# Altium footprint library MicroProcessor$.PcbLib: 8 footprints (part 2 of 2)
Each footprint in its own frame and in the unit in brackets; x right, y up, seen from the top. Pads: shape width x height; smd on the part's side, far side on the other; paste and mask are expansions set on the pad; w line width, h text height; cw(c..) or ccw(c..) is an arc to the next point about the centre after c.
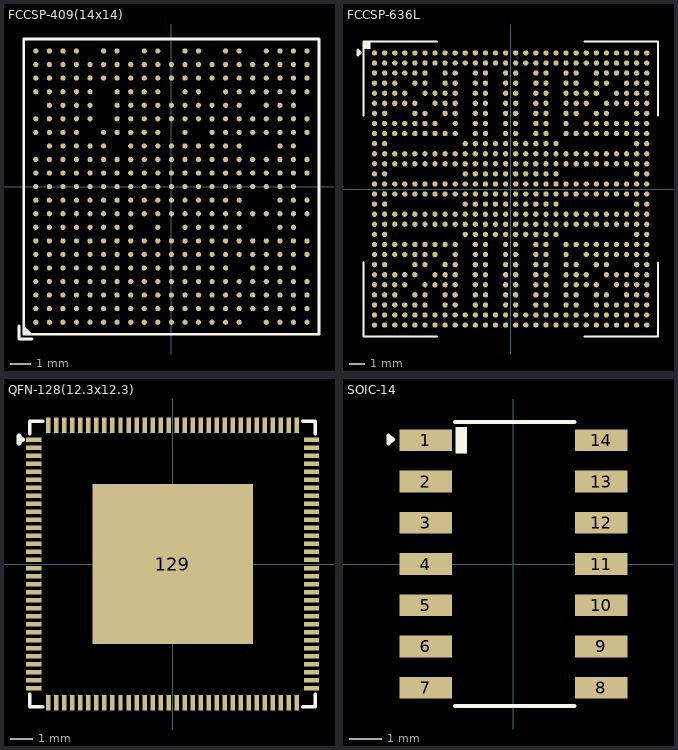
[diagram p1: the footprints below, top view; thin cyan lines are the x and y axes]

## FCCSP-409(14x14) [mm]
pads (409):
  round 0.248 smd paste-100 mask+0.051: A1(-6.5,-6.5) A2(-6.5,-5.85) A3(-6.5,-5.2) A4(-6.5,-4.55) A5(-6.5,-3.9) A6(-6.5,-3.25) A7(-6.5,-2.6) A8(-6.5,-1.95) A9(-6.5,-1.3) A10(-6.5,-0.65) A11(-6.5,0) A12(-6.5,0.65) A13(-6.5,1.3) A15(-6.5,2.6) A16(-6.5,3.25) A18(-6.5,4.55) A19(-6.5,5.2) A20(-6.5,5.85) A21(-6.5,6.5) AA1(6.5,-6.5) AA2(6.5,-5.85) AA3(6.5,-5.2) AA4(6.5,-4.55) AA6(6.5,-3.25) AA7(6.5,-2.6) AA9(6.5,-1.3) AA10(6.5,-0.65) AA12(6.5,0.65) AA13(6.5,1.3) AA15(6.5,2.6) AA16(6.5,3.25) AA18(6.5,4.55) AA19(6.5,5.2) AA20(6.5,5.85) AA21(6.5,6.5) B1(-5.85,-6.5) B2(-5.85,-5.85) B3(-5.85,-5.2) B4(-5.85,-4.55) B5(-5.85,-3.9) B6(-5.85,-3.25) B7(-5.85,-2.6) B8(-5.85,-1.95) B9(-5.85,-1.3) B10(-5.85,-0.65) B11(-5.85,0) B12(-5.85,0.65) B13(-5.85,1.3) B14(-5.85,1.95) B15(-5.85,2.6) B16(-5.85,3.25) B17(-5.85,3.9) B18(-5.85,4.55) B19(-5.85,5.2) B20(-5.85,5.85) B21(-5.85,6.5) C1(-5.2,-6.5) C2(-5.2,-5.85) C3(-5.2,-5.2) C4(-5.2,-4.55) C5(-5.2,-3.9) C6(-5.2,-3.25) C7(-5.2,-2.6) C8(-5.2,-1.95) C9(-5.2,-1.3) C10(-5.2,-0.65) C11(-5.2,0) C12(-5.2,0.65) C13(-5.2,1.3) C14(-5.2,1.95) C15(-5.2,2.6) C16(-5.2,3.25) C17(-5.2,3.9) C18(-5.2,4.55) C19(-5.2,5.2) C20(-5.2,5.85) C21(-5.2,6.5) D1(-4.55,-6.5) D2(-4.55,-5.85) D3(-4.55,-5.2) D4(-4.55,-4.55) D5(-4.55,-3.9) D6(-4.55,-3.25) D7(-4.55,-2.6) D8(-4.55,-1.95) D9(-4.55,-1.3) D10(-4.55,-0.65) D11(-4.55,0) D12(-4.55,0.65) D13(-4.55,1.3) D14(-4.55,1.95) D15(-4.55,2.6) D16(-4.55,3.25) D17(-4.55,3.9) D18(-4.55,4.55) D19(-4.55,5.2) D20(-4.55,5.85) D21(-4.55,6.5) E1(-3.9,-6.5) E2(-3.9,-5.85) E3(-3.9,-5.2) E4(-3.9,-4.55) E5(-3.9,-3.9) E6(-3.9,-3.25) E7(-3.9,-2.6) E8(-3.9,-1.95) E9(-3.9,-1.3) E10(-3.9,-0.65) E11(-3.9,0) E12(-3.9,0.65) E13(-3.9,1.3) E14(-3.9,1.95) E16(-3.9,3.25) E17(-3.9,3.9) E18(-3.9,4.55) E19(-3.9,5.2) E20(-3.9,5.85) F1(-3.25,-6.5) F2(-3.25,-5.85) F3(-3.25,-5.2) F4(-3.25,-4.55) F5(-3.25,-3.9) F6(-3.25,-3.25) F7(-3.25,-2.6) F8(-3.25,-1.95) F9(-3.25,-1.3) F10(-3.25,-0.65) F11(-3.25,0) F12(-3.25,0.65) F13(-3.25,1.3) F14(-3.25,1.95) F15(-3.25,2.6) F19(-3.25,5.2) F20(-3.25,5.85) F21(-3.25,6.5) G1(-2.6,-6.5) G2(-2.6,-5.85) G3(-2.6,-5.2) G4(-2.6,-4.55) G5(-2.6,-3.9) G6(-2.6,-3.25) G7(-2.6,-2.6) G8(-2.6,-1.95) G9(-2.6,-1.3) G10(-2.6,-0.65) G11(-2.6,0) G12(-2.6,0.65) G13(-2.6,1.3) G15(-2.6,2.6) G16(-2.6,3.25) G17(-2.6,3.9) G18(-2.6,4.55) G19(-2.6,5.2) G20(-2.6,5.85) G21(-2.6,6.5) H1(-1.95,-6.5) H2(-1.95,-5.85) H3(-1.95,-5.2) H4(-1.95,-4.55) H5(-1.95,-3.9) H6(-1.95,-3.25) H7(-1.95,-2.6) H8(-1.95,-1.95) H9(-1.95,-1.3) H10(-1.95,-0.65) H11(-1.95,0) H12(-1.95,0.65) H13(-1.95,1.3) H14(-1.95,1.95) H15(-1.95,2.6) H16(-1.95,3.25) H17(-1.95,3.9) H18(-1.95,4.55) H19(-1.95,5.2) H20(-1.95,5.85) J1(-1.3,-6.5) J2(-1.3,-5.85) J3(-1.3,-5.2) J4(-1.3,-4.55) J5(-1.3,-3.9) J6(-1.3,-3.25) J7(-1.3,-2.6) J9(-1.3,-1.3) J10(-1.3,-0.65) J11(-1.3,0) J12(-1.3,0.65) J13(-1.3,1.3) J14(-1.3,1.95) J15(-1.3,2.6) J16(-1.3,3.25) J17(-1.3,3.9) J18(-1.3,4.55) J19(-1.3,5.2) J20(-1.3,5.85) J21(-1.3,6.5) K1(-0.65,-6.5) K2(-0.65,-5.85) K3(-0.65,-5.2) K4(-0.65,-4.55) K5(-0.65,-3.9) K6(-0.65,-3.25) K7(-0.65,-2.6) K8(-0.65,-1.95) K9(-0.65,-1.3) K10(-0.65,-0.65) K11(-0.65,0) K12(-0.65,0.65) K13(-0.65,1.3) K14(-0.65,1.95) K15(-0.65,2.6) K16(-0.65,3.25) K17(-0.65,3.9) K18(-0.65,4.55) K19(-0.65,5.2) K20(-0.65,5.85) K21(-0.65,6.5) L1(0,-6.5) L2(0,-5.85) L3(0,-5.2) L4(0,-4.55) L5(0,-3.9) L6(0,-3.25) L7(0,-2.6) L9(0,-1.3) L10(0,-0.65) L11(0,0) L12(0,0.65) L13(0,1.3) L14(0,1.95) L16(0,3.25) L17(0,3.9) L19(0,5.2) L20(0,5.85) M1(0.65,-6.5) M2(0.65,-5.85) M3(0.65,-5.2) M4(0.65,-4.55) M5(0.65,-3.9) M6(0.65,-3.25) M7(0.65,-2.6) M8(0.65,-1.95) M9(0.65,-1.3) M10(0.65,-0.65) M11(0.65,0) M12(0.65,0.65) M13(0.65,1.3) M14(0.65,1.95) M15(0.65,2.6) M16(0.65,3.25) M17(0.65,3.9) M18(0.65,4.55) M19(0.65,5.2) M20(0.65,5.85) M21(0.65,6.5) N1(1.3,-6.5) N2(1.3,-5.85) N3(1.3,-5.2) N4(1.3,-4.55) N5(1.3,-3.9) N6(1.3,-3.25) N7(1.3,-2.6) N8(1.3,-1.95) N9(1.3,-1.3) N10(1.3,-0.65) N11(1.3,0) N12(1.3,0.65) N13(1.3,1.3) N14(1.3,1.95) N16(1.3,3.25) N17(1.3,3.9) N18(1.3,4.55) N19(1.3,5.2) N20(1.3,5.85) N21(1.3,6.5) P1(1.95,-6.5) P2(1.95,-5.85) P3(1.95,-5.2) P4(1.95,-4.55) P5(1.95,-3.9) P6(1.95,-3.25) P7(1.95,-2.6) P8(1.95,-1.95) P9(1.95,-1.3) P10(1.95,-0.65) P11(1.95,0) P12(1.95,0.65) P13(1.95,1.3) P14(1.95,1.95) P15(1.95,2.6) P16(1.95,3.25) P17(1.95,3.9) P19(1.95,5.2) P20(1.95,5.85) R1(2.6,-6.5) R2(2.6,-5.85) R3(2.6,-5.2) R4(2.6,-4.55) R5(2.6,-3.9) R6(2.6,-3.25) R7(2.6,-2.6) R8(2.6,-1.95) R9(2.6,-1.3) R10(2.6,-0.65) R11(2.6,0) R12(2.6,0.65) R13(2.6,1.3) R14(2.6,1.95) R15(2.6,2.6) R16(2.6,3.25) R17(2.6,3.9) R18(2.6,4.55) R19(2.6,5.2) R20(2.6,5.85) R21(2.6,6.5) T1(3.25,-6.5) T2(3.25,-5.85) T3(3.25,-5.2) T4(3.25,-4.55) T6(3.25,-3.25) T7(3.25,-2.6) T8(3.25,-1.95) T9(3.25,-1.3) T10(3.25,-0.65) T11(3.25,0) T12(3.25,0.65) T13(3.25,1.3) T14(3.25,1.95) T15(3.25,2.6) T16(3.25,3.25) T17(3.25,3.9) T18(3.25,4.55) T19(3.25,5.2) T20(3.25,5.85) T21(3.25,6.5) U2(3.9,-5.85) U3(3.9,-5.2) U4(3.9,-4.55) U5(3.9,-3.9) U6(3.9,-3.25) U7(3.9,-2.6) U9(3.9,-1.3) U11(3.9,0) U12(3.9,0.65) U13(3.9,1.3) U15(3.9,2.6) U16(3.9,3.25) U18(3.9,4.55) U19(3.9,5.2) U20(3.9,5.85) V1(4.55,-6.5) V2(4.55,-5.85) V3(4.55,-5.2) V4(4.55,-4.55) V5(4.55,-3.9) V6(4.55,-3.25) V7(4.55,-2.6) V9(4.55,-1.3) V11(4.55,0) V12(4.55,0.65) V13(4.55,1.3) V15(4.55,2.6) V16(4.55,3.25) V17(4.55,3.9) V18(4.55,4.55) V19(4.55,5.2) V20(4.55,5.85) V21(4.55,6.5) W1(5.2,-6.5) W2(5.2,-5.85) W3(5.2,-5.2) W4(5.2,-4.55) W5(5.2,-3.9) W6(5.2,-3.25) W7(5.2,-2.6) W8(5.2,-1.95) W9(5.2,-1.3) W10(5.2,-0.65) W11(5.2,0) W12(5.2,0.65) W13(5.2,1.3) W14(5.2,1.95) W15(5.2,2.6) W16(5.2,3.25) W17(5.2,3.9) W18(5.2,4.55) W19(5.2,5.2) W20(5.2,5.85) W21(5.2,6.5) Y1(5.85,-6.5) Y2(5.85,-5.85) Y3(5.85,-5.2) Y4(5.85,-4.55) Y5(5.85,-3.9) Y6(5.85,-3.25) Y7(5.85,-2.6) Y8(5.85,-1.95) Y9(5.85,-1.3) Y10(5.85,-0.65) Y11(5.85,0) Y12(5.85,0.65) Y13(5.85,1.3) Y14(5.85,1.95) Y15(5.85,2.6) Y16(5.85,3.25) Y17(5.85,3.9) Y18(5.85,4.55) Y19(5.85,5.2) Y20(5.85,5.85) Y21(5.85,6.5)
Top Overlay:
  region: -7.076,-7.076 -6.676,-7.076 -7.076,-6.676
  lines w0.127: -7.076,-7.076 7.076,-7.076 7.076,7.076 -7.076,7.076 -7.076,-7.076
  lines w0.152: -7.305,-6.676 -7.305,-7.305 -6.676,-7.305
Top Paste:
  drawing of 409 lines, arcs and shapes, not listed
3D body "3D_PCB1_2024-06-04.step": height 0.84, standoff 0, extent -7,-7 7,7

## FCCSP-636L [mm]
pads (636):
  round 0.34 smd: A1(-8.775,8.775) A2(-8.125,8.775) A3(-7.475,8.775) A4(-6.825,8.775) A5(-6.175,8.775) A6(-5.525,8.775) A7(-4.875,8.775) A8(-4.225,8.775) A9(-3.575,8.775) A10(-2.925,8.775) A11(-2.275,8.775) A12(-1.625,8.775) A13(-0.975,8.775) A14(-0.325,8.775) A15(0.325,8.775) A16(0.975,8.775) A17(1.625,8.775) A18(2.275,8.775) A19(2.925,8.775) A20(3.575,8.775) A21(4.225,8.775) A22(4.875,8.775) A23(5.525,8.775) A24(6.175,8.775) A25(6.825,8.775) A26(7.475,8.775) A27(8.125,8.775) A28(8.775,8.775) AA1(-8.775,-4.225) AA2(-8.125,-4.225) AA3(-7.475,-4.225) AA4(-6.825,-4.225) AA5(-6.175,-4.225) AA6(-5.525,-4.225) AA7(-4.875,-4.225) AA9(-3.575,-4.225) AA11(-2.275,-4.225) AA12(-1.625,-4.225) AA14(-0.325,-4.225) AA15(0.325,-4.225) AA17(1.625,-4.225) AA18(2.275,-4.225) AA20(3.575,-4.225) AA22(4.875,-4.225) AA23(5.525,-4.225) AA24(6.175,-4.225) AA25(6.825,-4.225) AA26(7.475,-4.225) AA27(8.125,-4.225) AA28(8.775,-4.225) AB1(-8.775,-4.875) AB2(-8.125,-4.875) AB5(-6.175,-4.875) AB6(-5.525,-4.875) AB8(-4.225,-4.875) AB9(-3.575,-4.875) AB11(-2.275,-4.875) AB12(-1.625,-4.875) AB14(-0.325,-4.875) AB15(0.325,-4.875) AB17(1.625,-4.875) AB18(2.275,-4.875) AB20(3.575,-4.875) AB21(4.225,-4.875) AB23(5.525,-4.875) AB24(6.175,-4.875) AB27(8.125,-4.875) AB28(8.775,-4.875) AC1(-8.775,-5.525) AC2(-8.125,-5.525) AC3(-7.475,-5.525) AC4(-6.825,-5.525) AC5(-6.175,-5.525) AC7(-4.875,-5.525) AC8(-4.225,-5.525) AC9(-3.575,-5.525) AC11(-2.275,-5.525) AC12(-1.625,-5.525) AC14(-0.325,-5.525) AC15(0.325,-5.525) AC17(1.625,-5.525) AC18(2.275,-5.525) AC20(3.575,-5.525) AC21(4.225,-5.525) AC22(4.875,-5.525) AC24(6.175,-5.525) AC25(6.825,-5.525) AC26(7.475,-5.525) AC27(8.125,-5.525) AC28(8.775,-5.525) AD1(-8.775,-6.175) AD2(-8.125,-6.175) AD3(-7.475,-6.175) AD4(-6.825,-6.175) AD6(-5.525,-6.175) AD7(-4.875,-6.175) AD8(-4.225,-6.175) AD9(-3.575,-6.175) AD11(-2.275,-6.175) AD12(-1.625,-6.175) AD14(-0.325,-6.175) AD15(0.325,-6.175) AD17(1.625,-6.175) AD18(2.275,-6.175) AD20(3.575,-6.175) AD21(4.225,-6.175) AD22(4.875,-6.175) AD23(5.525,-6.175) AD25(6.825,-6.175) AD26(7.475,-6.175) AD27(8.125,-6.175) AD28(8.775,-6.175) AE1(-8.775,-6.825) AE2(-8.125,-6.825) AE3(-7.475,-6.825) AE5(-6.175,-6.825) AE6(-5.525,-6.825) AE8(-4.225,-6.825) AE9(-3.575,-6.825) AE11(-2.275,-6.825) AE12(-1.625,-6.825) AE14(-0.325,-6.825) AE15(0.325,-6.825) AE17(1.625,-6.825) AE18(2.275,-6.825) AE20(3.575,-6.825) AE21(4.225,-6.825) AE23(5.525,-6.825) AE24(6.175,-6.825) AE26(7.475,-6.825) AE27(8.125,-6.825) AE28(8.775,-6.825) AF1(-8.775,-7.475) AF2(-8.125,-7.475) AF3(-7.475,-7.475) AF4(-6.825,-7.475) AF5(-6.175,-7.475) AF6(-5.525,-7.475) AF8(-4.225,-7.475) AF9(-3.575,-7.475) AF11(-2.275,-7.475) AF12(-1.625,-7.475) AF14(-0.325,-7.475) AF15(0.325,-7.475) AF17(1.625,-7.475) AF18(2.275,-7.475) AF20(3.575,-7.475) AF21(4.225,-7.475) AF23(5.525,-7.475) AF24(6.175,-7.475) AF25(6.825,-7.475) AF26(7.475,-7.475) AF27(8.125,-7.475) AF28(8.775,-7.475) AG1(-8.775,-8.125) AG2(-8.125,-8.125) AG3(-7.475,-8.125) AG4(-6.825,-8.125) AG5(-6.175,-8.125) AG6(-5.525,-8.125) AG7(-4.875,-8.125) AG8(-4.225,-8.125) AG9(-3.575,-8.125) AG10(-2.925,-8.125) AG11(-2.275,-8.125) AG12(-1.625,-8.125) AG13(-0.975,-8.125) AG14(-0.325,-8.125) AG15(0.325,-8.125) AG16(0.975,-8.125) AG17(1.625,-8.125) AG18(2.275,-8.125) AG19(2.925,-8.125) AG20(3.575,-8.125) AG21(4.225,-8.125) AG22(4.875,-8.125) AG23(5.525,-8.125) AG24(6.175,-8.125) AG25(6.825,-8.125) AG26(7.475,-8.125) AG27(8.125,-8.125) AG28(8.775,-8.125) AH1(-8.775,-8.775) AH2(-8.125,-8.775) AH3(-7.475,-8.775) AH4(-6.825,-8.775) AH5(-6.175,-8.775) AH6(-5.525,-8.775) AH7(-4.875,-8.775) AH8(-4.225,-8.775) AH9(-3.575,-8.775) AH10(-2.925,-8.775) AH11(-2.275,-8.775) AH12(-1.625,-8.775) AH13(-0.975,-8.775) AH14(-0.325,-8.775) AH15(0.325,-8.775) AH16(0.975,-8.775) AH17(1.625,-8.775) AH18(2.275,-8.775) AH19(2.925,-8.775) AH20(3.575,-8.775) AH21(4.225,-8.775) AH22(4.875,-8.775) AH23(5.525,-8.775) AH24(6.175,-8.775) AH25(6.825,-8.775) AH26(7.475,-8.775) AH27(8.125,-8.775) AH28(8.775,-8.775) B1(-8.775,8.125) B2(-8.125,8.125) B3(-7.475,8.125) B4(-6.825,8.125) B5(-6.175,8.125) B6(-5.525,8.125) B7(-4.875,8.125) B8(-4.225,8.125) B9(-3.575,8.125) B10(-2.925,8.125) B11(-2.275,8.125) B12(-1.625,8.125) B13(-0.975,8.125) B14(-0.325,8.125) B15(0.325,8.125) B16(0.975,8.125) B17(1.625,8.125) B18(2.275,8.125) B19(2.925,8.125) B20(3.575,8.125) B21(4.225,8.125) B22(4.875,8.125) B23(5.525,8.125) B24(6.175,8.125) B25(6.825,8.125) B26(7.475,8.125) B27(8.125,8.125) B28(8.775,8.125) C1(-8.775,7.475) C2(-8.125,7.475) C3(-7.475,7.475) C4(-6.825,7.475) C5(-6.175,7.475) C6(-5.525,7.475) C8(-4.225,7.475) C9(-3.575,7.475) C11(-2.275,7.475) C12(-1.625,7.475) C14(-0.325,7.475) C15(0.325,7.475) C17(1.625,7.475) C18(2.275,7.475) C20(3.575,7.475) C21(4.225,7.475) C23(5.525,7.475) C24(6.175,7.475) C25(6.825,7.475) C26(7.475,7.475) C27(8.125,7.475) C28(8.775,7.475) D1(-8.775,6.825) D2(-8.125,6.825) D3(-7.475,6.825) D5(-6.175,6.825) D6(-5.525,6.825) D8(-4.225,6.825) D9(-3.575,6.825) D11(-2.275,6.825) D12(-1.625,6.825) D14(-0.325,6.825) D15(0.325,6.825) D17(1.625,6.825) D18(2.275,6.825) D20(3.575,6.825) D21(4.225,6.825) D23(5.525,6.825) D24(6.175,6.825) D26(7.475,6.825) D27(8.125,6.825) D28(8.775,6.825) E1(-8.775,6.175) E2(-8.125,6.175) E3(-7.475,6.175) E4(-6.825,6.175) E6(-5.525,6.175) E7(-4.875,6.175) E8(-4.225,6.175) E9(-3.575,6.175) E11(-2.275,6.175) E12(-1.625,6.175) E14(-0.325,6.175) E15(0.325,6.175) E17(1.625,6.175) E18(2.275,6.175) E20(3.575,6.175) E21(4.225,6.175) E22(4.875,6.175) E23(5.525,6.175) E25(6.825,6.175) E26(7.475,6.175) E27(8.125,6.175) E28(8.775,6.175) F1(-8.775,5.525) F2(-8.125,5.525) F3(-7.475,5.525) F4(-6.825,5.525) F5(-6.175,5.525) F7(-4.875,5.525) F8(-4.225,5.525) F9(-3.575,5.525) F11(-2.275,5.525) F12(-1.625,5.525) F14(-0.325,5.525) F15(0.325,5.525) F17(1.625,5.525) F18(2.275,5.525) F20(3.575,5.525) F21(4.225,5.525) F22(4.875,5.525) F24(6.175,5.525) F25(6.825,5.525) F26(7.475,5.525) F27(8.125,5.525) F28(8.775,5.525) G1(-8.775,4.875) G2(-8.125,4.875) G5(-6.175,4.875) G6(-5.525,4.875) G8(-4.225,4.875) G9(-3.575,4.875) G11(-2.275,4.875) G12(-1.625,4.875) G14(-0.325,4.875) G15(0.325,4.875) G17(1.625,4.875) G18(2.275,4.875) G20(3.575,4.875) G21(4.225,4.875) G23(5.525,4.875) G24(6.175,4.875) G27(8.125,4.875) G28(8.775,4.875) H1(-8.775,4.225) H2(-8.125,4.225) H3(-7.475,4.225) H4(-6.825,4.225) H5(-6.175,4.225) H6(-5.525,4.225) H7(-4.875,4.225) H9(-3.575,4.225) H11(-2.275,4.225) H12(-1.625,4.225) H14(-0.325,4.225) H15(0.325,4.225) H17(1.625,4.225) H18(2.275,4.225) H20(3.575,4.225) H22(4.875,4.225) H23(5.525,4.225) H24(6.175,4.225) H25(6.825,4.225) H26(7.475,4.225) H27(8.125,4.225) H28(8.775,4.225) J1(-8.775,3.575) J2(-8.125,3.575) J3(-7.475,3.575) J4(-6.825,3.575) J5(-6.175,3.575) J6(-5.525,3.575) J7(-4.875,3.575) J8(-4.225,3.575) J9(-3.575,3.575) J11(-2.275,3.575) J12(-1.625,3.575) J14(-0.325,3.575) J15(0.325,3.575) J17(1.625,3.575) J18(2.275,3.575) J20(3.575,3.575) J21(4.225,3.575) J22(4.875,3.575) J23(5.525,3.575) J24(6.175,3.575) J25(6.825,3.575) J26(7.475,3.575) J27(8.125,3.575) J28(8.775,3.575) K1(-8.775,2.925) K2(-8.125,2.925) K10(-2.925,2.925) K11(-2.275,2.925) K12(-1.625,2.925) K13(-0.975,2.925) K14(-0.325,2.925) K15(0.325,2.925) K16(0.975,2.925) K17(1.625,2.925) K18(2.275,2.925) K19(2.925,2.925) K27(8.125,2.925) K28(8.775,2.925) L1(-8.775,2.275) L2(-8.125,2.275) L3(-7.475,2.275) L4(-6.825,2.275) L5(-6.175,2.275) L6(-5.525,2.275) L7(-4.875,2.275) L8(-4.225,2.275) L9(-3.575,2.275) L10(-2.925,2.275) L11(-2.275,2.275) L12(-1.625,2.275) L13(-0.975,2.275) L14(-0.325,2.275) L15(0.325,2.275) L16(0.975,2.275) L17(1.625,2.275) L18(2.275,2.275) L19(2.925,2.275) L20(3.575,2.275) L21(4.225,2.275) L22(4.875,2.275) L23(5.525,2.275) L24(6.175,2.275) L25(6.825,2.275) L26(7.475,2.275) L27(8.125,2.275) L28(8.775,2.275) M1(-8.775,1.625) M2(-8.125,1.625) M3(-7.475,1.625) M4(-6.825,1.625) M5(-6.175,1.625) M6(-5.525,1.625) M7(-4.875,1.625) M8(-4.225,1.625) M9(-3.575,1.625) M10(-2.925,1.625) M11(-2.275,1.625) M12(-1.625,1.625) M13(-0.975,1.625) M14(-0.325,1.625) M15(0.325,1.625) M16(0.975,1.625) M17(1.625,1.625) M18(2.275,1.625) M19(2.925,1.625) M20(3.575,1.625) M21(4.225,1.625) M22(4.875,1.625) M23(5.525,1.625) M24(6.175,1.625) M25(6.825,1.625) M26(7.475,1.625) M27(8.125,1.625) M28(8.775,1.625) N1(-8.775,0.975) N2(-8.125,0.975) N10(-2.925,0.975) N11(-2.275,0.975) N12(-1.625,0.975) N13(-0.975,0.975) N14(-0.325,0.975) N15(0.325,0.975) N16(0.975,0.975) N17(1.625,0.975) N18(2.275,0.975) N19(2.925,0.975) N27(8.125,0.975) N28(8.775,0.975) P1(-8.775,0.325) P2(-8.125,0.325) P3(-7.475,0.325) P4(-6.825,0.325) P5(-6.175,0.325) P6(-5.525,0.325) P7(-4.875,0.325) P8(-4.225,0.325) P9(-3.575,0.325) P10(-2.925,0.325) P11(-2.275,0.325) P12(-1.625,0.325) P13(-0.975,0.325) P14(-0.325,0.325) P15(0.325,0.325) P16(0.975,0.325) P17(1.625,0.325) P18(2.275,0.325) P19(2.925,0.325) P20(3.575,0.325) P21(4.225,0.325) P22(4.875,0.325) P23(5.525,0.325) P24(6.175,0.325) P25(6.825,0.325) P26(7.475,0.325) P27(8.125,0.325) P28(8.775,0.325) R1(-8.775,-0.325) R2(-8.125,-0.325) R3(-7.475,-0.325) R4(-6.825,-0.325) R5(-6.175,-0.325) R6(-5.525,-0.325) R7(-4.875,-0.325) R8(-4.225,-0.325) R9(-3.575,-0.325) R10(-2.925,-0.325) R11(-2.275,-0.325) R12(-1.625,-0.325) R13(-0.975,-0.325) R14(-0.325,-0.325) R15(0.325,-0.325) R16(0.975,-0.325) R17(1.625,-0.325) R18(2.275,-0.325) R19(2.925,-0.325) R20(3.575,-0.325) R21(4.225,-0.325) R22(4.875,-0.325) R23(5.525,-0.325) R24(6.175,-0.325) R25(6.825,-0.325) R26(7.475,-0.325) R27(8.125,-0.325) R28(8.775,-0.325) T1(-8.775,-0.975) T2(-8.125,-0.975) T10(-2.925,-0.975) T11(-2.275,-0.975) T12(-1.625,-0.975) T13(-0.975,-0.975) T14(-0.325,-0.975) T15(0.325,-0.975) T16(0.975,-0.975) T17(1.625,-0.975) T18(2.275,-0.975) T19(2.925,-0.975) T27(8.125,-0.975) T28(8.775,-0.975) U1(-8.775,-1.625) U2(-8.125,-1.625) U3(-7.475,-1.625) U4(-6.825,-1.625) U5(-6.175,-1.625) U6(-5.525,-1.625) U7(-4.875,-1.625) U8(-4.225,-1.625) U9(-3.575,-1.625) U10(-2.925,-1.625) U11(-2.275,-1.625) U12(-1.625,-1.625) U13(-0.975,-1.625) U14(-0.325,-1.625) U15(0.325,-1.625) U16(0.975,-1.625) U17(1.625,-1.625) U18(2.275,-1.625) U19(2.925,-1.625) U20(3.575,-1.625) U21(4.225,-1.625) U22(4.875,-1.625) U23(5.525,-1.625) U24(6.175,-1.625) U25(6.825,-1.625) U26(7.475,-1.625) U27(8.125,-1.625) U28(8.775,-1.625) V1(-8.775,-2.275) V2(-8.125,-2.275) V3(-7.475,-2.275) V4(-6.825,-2.275) V5(-6.175,-2.275) V6(-5.525,-2.275) V7(-4.875,-2.275) V8(-4.225,-2.275) V9(-3.575,-2.275) V10(-2.925,-2.275) V11(-2.275,-2.275) V12(-1.625,-2.275) V13(-0.975,-2.275) V14(-0.325,-2.275) V15(0.325,-2.275) V16(0.975,-2.275) V17(1.625,-2.275) V18(2.275,-2.275) V19(2.925,-2.275) V20(3.575,-2.275) V21(4.225,-2.275) V22(4.875,-2.275) V23(5.525,-2.275) V24(6.175,-2.275) V25(6.825,-2.275) V26(7.475,-2.275) V27(8.125,-2.275) V28(8.775,-2.275) W1(-8.775,-2.925) W2(-8.125,-2.925) W10(-2.925,-2.925) W11(-2.275,-2.925) W12(-1.625,-2.925) W13(-0.975,-2.925) W14(-0.325,-2.925) W15(0.325,-2.925) W16(0.975,-2.925) W17(1.625,-2.925) W18(2.275,-2.925) W19(2.925,-2.925) W27(8.125,-2.925) W28(8.775,-2.925) Y1(-8.775,-3.575) Y2(-8.125,-3.575) Y3(-7.475,-3.575) Y4(-6.825,-3.575) Y5(-6.175,-3.575) Y6(-5.525,-3.575) Y7(-4.875,-3.575) Y8(-4.225,-3.575) Y9(-3.575,-3.575) Y11(-2.275,-3.575) Y12(-1.625,-3.575) Y14(-0.325,-3.575) Y15(0.325,-3.575) Y17(1.625,-3.575) Y18(2.275,-3.575) Y20(3.575,-3.575) Y21(4.225,-3.575) Y22(4.875,-3.575) Y23(5.525,-3.575) Y24(6.175,-3.575) Y25(6.825,-3.575) Y26(7.475,-3.575) Y27(8.125,-3.575) Y28(8.775,-3.575)
Top Overlay:
  rectangle: -9.5,9.029 -9.029,9.5
  lines w0.127: -9.5,-4.75 -9.5,-9.5 -4.75,-9.5 ; -9.5,4.75 -9.5,9.5 -4.75,9.5 ; 4.75,-9.5 9.5,-9.5 9.5,-4.75 ; 4.75,9.5 9.5,9.5 9.5,4.75
  lines w0.2: -9.842,8.648 -9.842,8.953 -9.689,8.8 -9.842,8.648
3D body "step_temp.STEP": height 1.68, standoff 0, extent -9.5,-9.5 9.5,9.5

## QFN-128(12.3x12.3) [mm]
pads (129):
  rect 0.665x0.196 smd paste+0 mask+0.05: 1(-6.057,5.425) 2(-6.057,5.075) 3(-6.057,4.725) 4(-6.057,4.375) 5(-6.057,4.025) 6(-6.057,3.675) 7(-6.057,3.325) 8(-6.057,2.975) 9(-6.057,2.625) 10(-6.057,2.275) 11(-6.057,1.925) 12(-6.057,1.575) 13(-6.057,1.225) 14(-6.057,0.875) 15(-6.057,0.525) 16(-6.057,0.175) 17(-6.057,-0.175) 18(-6.057,-0.525) 19(-6.057,-0.875) 20(-6.057,-1.225) 21(-6.057,-1.575) 22(-6.057,-1.925) 23(-6.057,-2.275) 24(-6.057,-2.625) 25(-6.057,-2.975) 26(-6.057,-3.325) 27(-6.057,-3.675) 28(-6.057,-4.025) 29(-6.057,-4.375) 30(-6.057,-4.725) 31(-6.057,-5.075) 32(-6.057,-5.425) 65(6.057,-5.425) 66(6.057,-5.075) 67(6.057,-4.725) 68(6.057,-4.375) 69(6.057,-4.025) 70(6.057,-3.675) 71(6.057,-3.325) 72(6.057,-2.975) 73(6.057,-2.625) 74(6.057,-2.275) 75(6.057,-1.925) 76(6.057,-1.575) 77(6.057,-1.225) 78(6.057,-0.875) 79(6.057,-0.525) 80(6.057,-0.175) 81(6.057,0.175) 82(6.057,0.525) 83(6.057,0.875) 84(6.057,1.225) 85(6.057,1.575) 86(6.057,1.925) 87(6.057,2.275) 88(6.057,2.625) 89(6.057,2.975) 90(6.057,3.325) 91(6.057,3.675) 92(6.057,4.025) 93(6.057,4.375) 94(6.057,4.725) 95(6.057,5.075) 96(6.057,5.425)
  rect 0.196x0.665 smd paste+0 mask+0.05: 33(-5.425,-6.057) 34(-5.075,-6.057) 35(-4.725,-6.057) 36(-4.375,-6.057) 37(-4.025,-6.057) 38(-3.675,-6.057) 39(-3.325,-6.057) 40(-2.975,-6.057) 41(-2.625,-6.057) 42(-2.275,-6.057) 43(-1.925,-6.057) 44(-1.575,-6.057) 45(-1.225,-6.057) 46(-0.875,-6.057) 47(-0.525,-6.057) 48(-0.175,-6.057) 49(0.175,-6.057) 50(0.525,-6.057) 51(0.875,-6.057) 52(1.225,-6.057) 53(1.575,-6.057) 54(1.925,-6.057) 55(2.275,-6.057) 56(2.625,-6.057) 57(2.975,-6.057) 58(3.325,-6.057) 59(3.675,-6.057) 60(4.025,-6.057) 61(4.375,-6.057) 62(4.725,-6.057) 63(5.075,-6.057) 64(5.425,-6.057) 97(5.425,6.057) 98(5.075,6.057) 99(4.725,6.057) 100(4.375,6.057) 101(4.025,6.057) 102(3.675,6.057) 103(3.325,6.057) 104(2.975,6.057) 105(2.625,6.057) 106(2.275,6.057) 107(1.925,6.057) 108(1.575,6.057) 109(1.225,6.057) 110(0.875,6.057) 111(0.525,6.057) 112(0.175,6.057) 113(-0.175,6.057) 114(-0.525,6.057) 115(-0.875,6.057) 116(-1.225,6.057) 117(-1.575,6.057) 118(-1.925,6.057) 119(-2.275,6.057) 120(-2.625,6.057) 121(-2.975,6.057) 122(-3.325,6.057) 123(-3.675,6.057) 124(-4.025,6.057) 125(-4.375,6.057) 126(-4.725,6.057) 127(-5.075,6.057) 128(-5.425,6.057)
  rect 7x7 smd paste+0 mask+0.05: 129(0,0)
Top Overlay:
  lines w0.152: -6.226,-5.675 -6.226,-6.226 -5.676,-6.226 ; -6.226,5.675 -6.226,6.226 -5.676,6.226 ; 5.675,-6.226 6.226,-6.226 6.226,-5.675 ; 5.675,6.226 6.226,6.226 6.226,5.675
  lines w0.2: -6.706,5.283 -6.553,5.436 -6.706,5.588 -6.706,5.283
3D body "C5328706.step": height 0.73, standoff 0, extent -6.16,-6.16 6.16,6.16

## SOIC-14 [mm]
pads (14):
  rect 1.62x0.67 smd: 1(-2.7,3.81) 2(-2.7,2.54) 3(-2.7,1.27) 4(-2.7,0) 5(-2.7,-1.27) 6(-2.7,-2.54) 7(-2.7,-3.81) 8(2.7,-3.81) 9(2.7,-2.54) 10(2.7,-1.27) 11(2.7,0) 12(2.7,1.27) 13(2.7,2.54) 14(2.7,3.81)
Top Overlay:
  rectangle: -1.787,3.404 -1.432,4.216
  lines w0.127: -1.803,-4.369 1.88,-4.369 ; -1.803,4.369 1.88,4.369 ; -3.845,3.708 -3.718,3.835 -3.845,3.962 -3.845,3.708
3D body "D0014A.stp": height 1.75, standoff 0, extent -3.013,-4.325 3.013,4.325